# Altium footprint library KartaRfLibs.PcbLib: 51 footprints (part 1 of 4)
Each footprint in its own frame and in the unit in brackets; x right, y up, seen from the top. Pads: shape width x height; smd on the part's side, far side on the other; paste and mask are expansions set on the pad; w line width, h text height; cw(c..) or ccw(c..) is an arc to the next point about the centre after c.
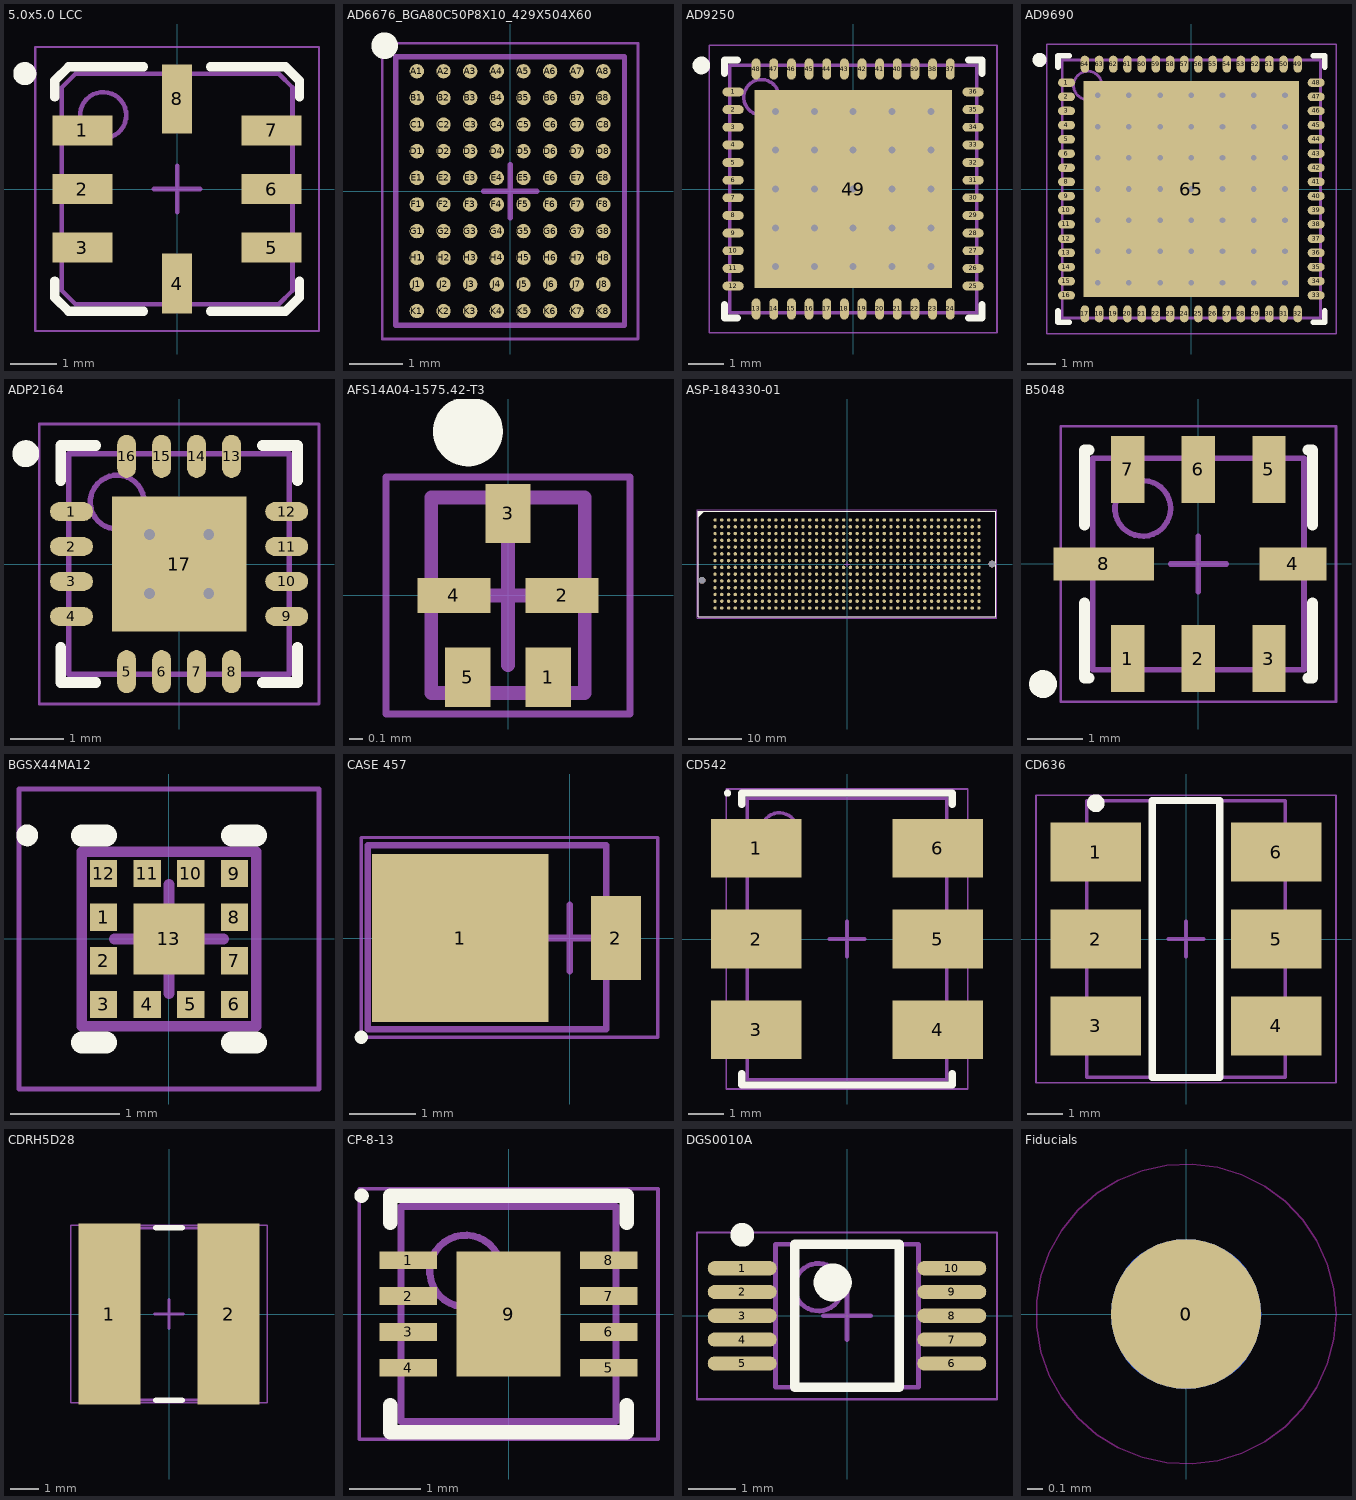
[diagram p0: the footprints below, top view; thin cyan lines are the x and y axes]

## 5.0x5.0 LCC [mm] "5.0x5.0 LCC 8-Leads, Body 5,00x5,00mm, Pitch 1,27mm, IPC Medium Density"
height 1.35
pads (8):
  rect 1.3x0.65 smd: 1(-2.05,1.27) 2(-2.05,0) 3(-2.05,-1.27) 5(2.05,-1.27) 6(2.05,0) 7(2.05,1.27)
  rect 0.65x1.3 smd: 4(0,-2.05)
  rect 0.65x1.5 smd: 8(0,1.95)
Top Overlay:
  circle w0.25: c-3.3,2.5 r0.125
  lines w0.2: -2.65,-1.995 -2.65,-2.35 -2.35,-2.65 -0.725,-2.65 ; -2.65,1.995 -2.65,2.35 -2.35,2.65 -0.725,2.65 ; 0.725,-2.65 2.35,-2.65 2.65,-2.35 2.65,-1.995 ; 0.725,2.65 2.35,2.65 2.65,2.35 2.65,1.995
Mechanical 13:
  circle w0.1: c-1.6,1.6 r0.5
  lines w0.1: -2.5,-2.2 -2.2,-2.5 2.2,-2.5 2.5,-2.2 2.5,2.2 2.2,2.5 -2.2,2.5 -2.5,2.2 -2.5,-2.2
Mechanical 15:
  lines w0.05: -3.075,-3.075 -3.075,3.075 3.075,3.075 3.075,-3.075 -3.075,-3.075
  lines w0.1: -0.5,0 0.5,0 ; 0,-0.5 0,0.5
3D body "5.0x5.0 LCC.step": height 1.35, standoff 0, extent -2.52,-2.52 2.52,2.52

## AD6676_BGA80C50P8X10_429X504X60 [mm] "AD6676 BGA, 80-Leads, Body 4,29x5,04mmx0,60mm, Pitch 0,50mm"
height 0.6
pads (80):
  round 0.27 smd: A1(-1.75,2.25) A2(-1.25,2.25) A3(-0.75,2.25) A4(-0.25,2.25) A5(0.25,2.25) A6(0.75,2.25) A7(1.25,2.25) A8(1.75,2.25) B1(-1.75,1.75) B2(-1.25,1.75) B3(-0.75,1.75) B4(-0.25,1.75) B5(0.25,1.75) B6(0.75,1.75) B7(1.25,1.75) B8(1.75,1.75) C1(-1.75,1.25) C2(-1.25,1.25) C3(-0.75,1.25) C4(-0.25,1.25) C5(0.25,1.25) C6(0.75,1.25) C7(1.25,1.25) C8(1.75,1.25) D1(-1.75,0.75) D2(-1.25,0.75) D3(-0.75,0.75) D4(-0.25,0.75) D5(0.25,0.75) D6(0.75,0.75) D7(1.25,0.75) D8(1.75,0.75) E1(-1.75,0.25) E2(-1.25,0.25) E3(-0.75,0.25) E4(-0.25,0.25) E5(0.25,0.25) E6(0.75,0.25) E7(1.25,0.25) E8(1.75,0.25) F1(-1.75,-0.25) F2(-1.25,-0.25) F3(-0.75,-0.25) F4(-0.25,-0.25) F5(0.25,-0.25) F6(0.75,-0.25) F7(1.25,-0.25) F8(1.75,-0.25) G1(-1.75,-0.75) G2(-1.25,-0.75) G3(-0.75,-0.75) G4(-0.25,-0.75) G5(0.25,-0.75) G6(0.75,-0.75) G7(1.25,-0.75) G8(1.75,-0.75) H1(-1.75,-1.25) H2(-1.25,-1.25) H3(-0.75,-1.25) H4(-0.25,-1.25) H5(0.25,-1.25) H6(0.75,-1.25) H7(1.25,-1.25) H8(1.75,-1.25) J1(-1.75,-1.75) J2(-1.25,-1.75) J3(-0.75,-1.75) J4(-0.25,-1.75) J5(0.25,-1.75) J6(0.75,-1.75) J7(1.25,-1.75) J8(1.75,-1.75) K1(-1.75,-2.25) K2(-1.25,-2.25) K3(-0.75,-2.25) K4(-0.25,-2.25) K5(0.25,-2.25) K6(0.75,-2.25) K7(1.25,-2.25) K8(1.75,-2.25)
Top Overlay:
  circle w0.25: c-2.355,2.73 r0.125
Mechanical 13:
  lines w0.1: -2.145,-2.52 -2.145,2.52 2.145,2.52 2.145,-2.52 -2.145,-2.52
Mechanical 15:
  lines w0.05: -2.4,-2.775 -2.4,2.775 2.4,2.775 2.4,-2.775 -2.4,-2.775
  lines w0.1: -0.5,0 0.5,0 ; 0,-0.5 0,0.5
3D body "AD6676_BGA80C50P8X10_429X504X60.step": height 0.6, standoff 0, extent -2.145,-2.52 2.145,2.52

## AD9250 [mm] "AD5250, QFN, 48-Leads, Body 7,00x7,00mm, Pitch 0,50mm, Thermal Pad 5,60x5,60mm, IPC Medium Density"
height 0.8
pads (49):
  oval 0.6x0.25 smd: 1(-3.4,2.75) 2(-3.4,2.25) 3(-3.4,1.75) 4(-3.4,1.25) 5(-3.4,0.75) 6(-3.4,0.25) 7(-3.4,-0.25) 8(-3.4,-0.75) 9(-3.4,-1.25) 10(-3.4,-1.75) 11(-3.4,-2.25) 12(-3.4,-2.75) 25(3.4,-2.75) 26(3.4,-2.25) 27(3.4,-1.75) 28(3.4,-1.25) 29(3.4,-0.75) 30(3.4,-0.25) 31(3.4,0.25) 32(3.4,0.75) 33(3.4,1.25) 34(3.4,1.75) 35(3.4,2.25) 36(3.4,2.75)
  oval 0.25x0.6 smd: 13(-2.75,-3.4) 14(-2.25,-3.4) 15(-1.75,-3.4) 16(-1.25,-3.4) 17(-0.75,-3.4) 18(-0.25,-3.4) 19(0.25,-3.4) 20(0.75,-3.4) 21(1.25,-3.4) 22(1.75,-3.4) 23(2.25,-3.4) 24(2.75,-3.4) 37(2.75,3.4) 38(2.25,3.4) 39(1.75,3.4) 40(1.25,3.4) 41(0.75,3.4) 42(0.25,3.4) 43(-0.25,3.4) 44(-0.75,3.4) 45(-1.25,3.4) 46(-1.75,3.4) 47(-2.25,3.4) 48(-2.75,3.4)
  rect 5.6x5.6 smd: 49(0,0)
via 2.2,-2.2 diameter 0.5 hole 0.2
via 1.1,-2.2 diameter 0.5 hole 0.2
via 0,-2.2 diameter 0.5 hole 0.2
via -1.1,-2.2 diameter 0.5 hole 0.2
via -2.2,-2.2 diameter 0.5 hole 0.2
via 2.2,-1.1 diameter 0.5 hole 0.2
via 1.1,-1.1 diameter 0.5 hole 0.2
via 0,-1.1 diameter 0.5 hole 0.2
via -1.1,-1.1 diameter 0.5 hole 0.2
via -2.2,-1.1 diameter 0.5 hole 0.2
via 2.2,0 diameter 0.5 hole 0.2
via 1.1,0 diameter 0.5 hole 0.2
via 0,0 diameter 0.5 hole 0.2
via -1.1,0 diameter 0.5 hole 0.2
via -2.2,0 diameter 0.5 hole 0.2
via 2.2,1.1 diameter 0.5 hole 0.2
via 1.1,1.1 diameter 0.5 hole 0.2
via 0,1.1 diameter 0.5 hole 0.2
via -1.1,1.1 diameter 0.5 hole 0.2
via -2.2,1.1 diameter 0.5 hole 0.2
via 2.2,2.2 diameter 0.5 hole 0.2
via 1.1,2.2 diameter 0.5 hole 0.2
via 0,2.2 diameter 0.5 hole 0.2
via -1.1,2.2 diameter 0.5 hole 0.2
via -2.2,2.2 diameter 0.5 hole 0.2
Top Overlay:
  circle w0.25: c-4.3,3.5 r0.125
  lines w0.2: -3.65,-3.275 -3.65,-3.65 -3.275,-3.65 ; -3.65,3.275 -3.65,3.65 -3.275,3.65 ; 3.275,-3.65 3.65,-3.65 3.65,-3.275 ; 3.275,3.65 3.65,3.65 3.65,3.275
Mechanical 13:
  circle w0.1: c-2.6,2.6 r0.5
  lines w0.1: -3.5,-3.5 3.5,-3.5 3.5,3.5 -3.5,3.5 -3.5,-3.5
Mechanical 15:
  lines w0.05: -4.075,-4.075 4.075,-4.075 4.075,4.075 -4.075,4.075 -4.075,-4.075
  lines w0.1: -0.5,0 0.5,0 ; 0,-0.5 0,0.5
3D body "AD5250.step": height 0.8, standoff 0, extent -3.52,-3.52 3.52,3.52

## AD9690 [mm] "AD9690 9 x 9mm, 64 pin, 0.5 pitch 7.6sq Pad"
height 0.8
pads (65):
  oval 0.6x0.3 smd: 1(-4.4,3.75) 2(-4.4,3.25) 3(-4.4,2.75) 4(-4.4,2.25) 5(-4.4,1.75) 6(-4.4,1.25) 7(-4.4,0.75) 8(-4.4,0.25) 9(-4.4,-0.25) 10(-4.4,-0.75) 11(-4.4,-1.25) 12(-4.4,-1.75) 13(-4.4,-2.25) 14(-4.4,-2.75) 15(-4.4,-3.25) 16(-4.4,-3.75) 33(4.4,-3.75) 34(4.4,-3.25) 35(4.4,-2.75) 36(4.4,-2.25) 37(4.4,-1.75) 38(4.4,-1.25) 39(4.4,-0.75) 40(4.4,-0.25) 41(4.4,0.25) 42(4.4,0.75) 43(4.4,1.25) 44(4.4,1.75) 45(4.4,2.25) 46(4.4,2.75) 47(4.4,3.25) 48(4.4,3.75)
  oval 0.3x0.6 smd: 17(-3.75,-4.4) 18(-3.25,-4.4) 19(-2.75,-4.4) 20(-2.25,-4.4) 21(-1.75,-4.4) 22(-1.25,-4.4) 23(-0.75,-4.4) 24(-0.25,-4.4) 25(0.25,-4.4) 26(0.75,-4.4) 27(1.25,-4.4) 28(1.75,-4.4) 29(2.25,-4.4) 30(2.75,-4.4) 31(3.25,-4.4) 32(3.75,-4.4) 49(3.75,4.4) 50(3.25,4.4) 51(2.75,4.4) 52(2.25,4.4) 53(1.75,4.4) 54(1.25,4.4) 55(0.75,4.4) 56(0.25,4.4) 57(-0.25,4.4) 58(-0.75,4.4) 59(-1.25,4.4) 60(-1.75,4.4) 61(-2.25,4.4) 62(-2.75,4.4) 63(-3.25,4.4) 64(-3.75,4.4)
  rect 7.6x7.6 smd: 65(0,0)
via 3.3,-3.3 diameter 0.5 hole 0.2
via 2.2,-3.3 diameter 0.5 hole 0.2
via 1.1,-3.3 diameter 0.5 hole 0.2
via 0,-3.3 diameter 0.5 hole 0.2
via -1.1,-3.3 diameter 0.5 hole 0.2
via -2.2,-3.3 diameter 0.5 hole 0.2
via -3.3,-3.3 diameter 0.5 hole 0.2
via 3.3,-2.2 diameter 0.5 hole 0.2
via 2.2,-2.2 diameter 0.5 hole 0.2
via 1.1,-2.2 diameter 0.5 hole 0.2
via 0,-2.2 diameter 0.5 hole 0.2
via -1.1,-2.2 diameter 0.5 hole 0.2
via -2.2,-2.2 diameter 0.5 hole 0.2
via -3.3,-2.2 diameter 0.5 hole 0.2
via 3.3,-1.1 diameter 0.5 hole 0.2
via 2.2,-1.1 diameter 0.5 hole 0.2
via 1.1,-1.1 diameter 0.5 hole 0.2
via 0,-1.1 diameter 0.5 hole 0.2
via -1.1,-1.1 diameter 0.5 hole 0.2
via -2.2,-1.1 diameter 0.5 hole 0.2
via -3.3,-1.1 diameter 0.5 hole 0.2
via 3.3,0 diameter 0.5 hole 0.2
via 2.2,0 diameter 0.5 hole 0.2
via 1.1,0 diameter 0.5 hole 0.2
via 0,0 diameter 0.5 hole 0.2
via -1.1,0 diameter 0.5 hole 0.2
via -2.2,0 diameter 0.5 hole 0.2
via -3.3,0 diameter 0.5 hole 0.2
via 3.3,1.1 diameter 0.5 hole 0.2
via 2.2,1.1 diameter 0.5 hole 0.2
via 1.1,1.1 diameter 0.5 hole 0.2
via 0,1.1 diameter 0.5 hole 0.2
via -1.1,1.1 diameter 0.5 hole 0.2
via -2.2,1.1 diameter 0.5 hole 0.2
via -3.3,1.1 diameter 0.5 hole 0.2
via 3.3,2.2 diameter 0.5 hole 0.2
via 2.2,2.2 diameter 0.5 hole 0.2
via 1.1,2.2 diameter 0.5 hole 0.2
via 0,2.2 diameter 0.5 hole 0.2
via -1.1,2.2 diameter 0.5 hole 0.2
via -2.2,2.2 diameter 0.5 hole 0.2
via -3.3,2.2 diameter 0.5 hole 0.2
via 3.3,3.3 diameter 0.5 hole 0.2
via 2.2,3.3 diameter 0.5 hole 0.2
via 1.1,3.3 diameter 0.5 hole 0.2
via 0,3.3 diameter 0.5 hole 0.2
via -1.1,3.3 diameter 0.5 hole 0.2
via -2.2,3.3 diameter 0.5 hole 0.2
via -3.3,3.3 diameter 0.5 hole 0.2
Top Overlay:
  circle w0.25: c-5.35,4.55 r0.125
  lines w0.2: -4.7,-4.3 -4.7,-4.7 -4.3,-4.7 ; -4.7,4.3 -4.7,4.7 -4.3,4.7 ; 4.3,-4.7 4.7,-4.7 4.7,-4.3 ; 4.3,4.7 4.7,4.7 4.7,4.3
Mechanical 13:
  circle w0.1: c-3.65,3.65 r0.5
  lines w0.1: -4.55,-4.55 4.55,-4.55 4.55,4.55 -4.55,4.55 -4.55,-4.55
Mechanical 15:
  lines w0.05: -5.1,-5.1 5.1,-5.1 5.1,5.1 -5.1,5.1 -5.1,-5.1
  lines w0.1: -0.5,0 0.5,0 ; 0,-0.5 0,0.5
3D body "AD9690.step": height 0.8, standoff 0, extent -4.57,-4.57 4.57,4.57

## ADP2164 [mm] "ADP2164, QFN, 16-Leads, Body 4,00x4,00mm, Pitch 0,65mm, Thermal Pad 2,50x2,50mm, IPC Medium Density"
height 0.8
pads (17):
  oval 0.8x0.35 smd: 1(-2,0.975) 2(-2,0.325) 3(-2,-0.325) 4(-2,-0.975) 9(2,-0.975) 10(2,-0.325) 11(2,0.325) 12(2,0.975)
  oval 0.35x0.8 smd: 5(-0.975,-2) 6(-0.325,-2) 7(0.325,-2) 8(0.975,-2) 13(0.975,2) 14(0.325,2) 15(-0.325,2) 16(-0.975,2)
  rect 2.5x2.5 smd: 17(0,0)
via -0.55,0.55 diameter 0.5 hole 0.2
via 0.55,0.55 diameter 0.5 hole 0.2
via -0.55,-0.55 diameter 0.5 hole 0.2
via 0.55,-0.55 diameter 0.5 hole 0.2
Top Overlay:
  circle w0.25: c-2.85,2.05 r0.125
  lines w0.2: -2.2,-1.55 -2.2,-2.2 -1.55,-2.2 ; -2.2,1.55 -2.2,2.2 -1.55,2.2 ; 1.55,-2.2 2.2,-2.2 2.2,-1.55 ; 1.55,2.2 2.2,2.2 2.2,1.55
Mechanical 13:
  circle w0.1: c-1.15,1.15 r0.5
  lines w0.1: -2.05,-2.05 -2.05,2.05 2.05,2.05 2.05,-2.05 -2.05,-2.05
Mechanical 15:
  lines w0.05: -2.6,-2.6 -2.6,2.6 2.6,2.6 2.6,-2.6 -2.6,-2.6
  lines w0.1: -0.5,0 0.5,0 ; 0,-0.5 0,0.5
3D body "ADP2164.step": height 0.8, standoff 0, extent -2.06,-2.06 2.06,2.06

## AFS14A04-1575.42-T3 [mm] "AFS14A04-1575.42-T3, SAW Filter, 6-Leads, Body 1,40x0,90mm, Pitch 0,50mm, IPC Medium Density"
height 0.7
pads (5):
  rect 0.325x0.425 smd: 1(0.288,-0.587) 3(0,0.587) 5(-0.288,-0.587)
  rect 0.525x0.25 smd: 2(0.387,0) 4(-0.387,0)
Top Overlay:
  circle w0.25: c-0.288,1.175 r0.125
Mechanical 13:
  lines w0.1: -0.55,-0.7 0.55,-0.7 0.55,0.7 -0.55,0.7 -0.55,-0.7
Mechanical 15:
  lines w0.05: -0.875,-0.85 0.875,-0.85 0.875,0.85 -0.875,0.85 -0.875,-0.85
  lines w0.1: -0.5,0 0.5,0 ; 0,-0.5 0,0.5
3D body "AFS14A04-1575.42-T3.step": height 0.7, standoff 0, extent -0.548,-0.698 0.548,0.698

## ASP-184330-01 [mm] "Samtec ASP-184330-01 FMC+ connector, 560-Leads, Body 55,78x19,76mmx7,11mm, Pitch 1,27mm"
height 7.12
pads (560):
  round 0.64 smd paste+0 mask+0.125: A1(24.765,5.715) A2(23.495,5.715) A3(22.225,5.715) A4(20.955,5.715) A5(19.685,5.715) A6(18.415,5.715) A7(17.145,5.715) A8(15.875,5.715) A9(14.605,5.715) A10(13.335,5.715) A11(12.065,5.715) A12(10.795,5.715) A13(9.525,5.715) A14(8.255,5.715) A15(6.985,5.715) A16(5.715,5.715) A17(4.445,5.715) A18(3.175,5.715) A19(1.905,5.715) A20(0.635,5.715) A21(-0.635,5.715) A22(-1.905,5.715) A23(-3.175,5.715) A24(-4.445,5.715) A25(-5.715,5.715) A26(-6.985,5.715) A27(-8.255,5.715) A28(-9.525,5.715) A29(-10.795,5.715) A30(-12.065,5.715) A31(-13.335,5.715) A32(-14.605,5.715) A33(-15.875,5.715) A34(-17.145,5.715) A35(-18.415,5.715) A36(-19.685,5.715) A37(-20.955,5.715) A38(-22.225,5.715) A39(-23.495,5.715) A40(-24.765,5.715) B1(24.765,4.445) B2(23.495,4.445) B3(22.225,4.445) B4(20.955,4.445) B5(19.685,4.445) B6(18.415,4.445) B7(17.145,4.445) B8(15.875,4.445) B9(14.605,4.445) B10(13.335,4.445) B11(12.065,4.445) B12(10.795,4.445) B13(9.525,4.445) B14(8.255,4.445) B15(6.985,4.445) B16(5.715,4.445) B17(4.445,4.445) B18(3.175,4.445) B19(1.905,4.445) B20(0.635,4.445) B21(-0.635,4.445) B22(-1.905,4.445) B23(-3.175,4.445) B24(-4.445,4.445) B25(-5.715,4.445) B26(-6.985,4.445) B27(-8.255,4.445) B28(-9.525,4.445) B29(-10.795,4.445) B30(-12.065,4.445) B31(-13.335,4.445) B32(-14.605,4.445) B33(-15.875,4.445) B34(-17.145,4.445) B35(-18.415,4.445) B36(-19.685,4.445) B37(-20.955,4.445) B38(-22.225,4.445) B39(-23.495,4.445) B40(-24.765,4.445) C1(24.765,3.175) C2(23.495,3.175) C3(22.225,3.175) C4(20.955,3.175) C5(19.685,3.175) C6(18.415,3.175) C7(17.145,3.175) C8(15.875,3.175) C9(14.605,3.175) C10(13.335,3.175) C11(12.065,3.175) C12(10.795,3.175) C13(9.525,3.175) C14(8.255,3.175) C15(6.985,3.175) C16(5.715,3.175) C17(4.445,3.175) C18(3.175,3.175) C19(1.905,3.175) C20(0.635,3.175) C21(-0.635,3.175) C22(-1.905,3.175) C23(-3.175,3.175) C24(-4.445,3.175) C25(-5.715,3.175) C26(-6.985,3.175) C27(-8.255,3.175) C28(-9.525,3.175) C29(-10.795,3.175) C30(-12.065,3.175) C31(-13.335,3.175) C32(-14.605,3.175) C33(-15.875,3.175) C34(-17.145,3.175) C35(-18.415,3.175) C36(-19.685,3.175) C37(-20.955,3.175) C38(-22.225,3.175) C39(-23.495,3.175) C40(-24.765,3.175) D1(24.765,1.905) D2(23.495,1.905) D3(22.225,1.905) D4(20.955,1.905) D5(19.685,1.905) D6(18.415,1.905) D7(17.145,1.905) D8(15.875,1.905) D9(14.605,1.905) D10(13.335,1.905) D11(12.065,1.905) D12(10.795,1.905) D13(9.525,1.905) D14(8.255,1.905) D15(6.985,1.905) D16(5.715,1.905) D17(4.445,1.905) D18(3.175,1.905) D19(1.905,1.905) D20(0.635,1.905) D21(-0.635,1.905) D22(-1.905,1.905) D23(-3.175,1.905) D24(-4.445,1.905) D25(-5.715,1.905) D26(-6.985,1.905) D27(-8.255,1.905) D28(-9.525,1.905) D29(-10.795,1.905) D30(-12.065,1.905) D31(-13.335,1.905) D32(-14.605,1.905) D33(-15.875,1.905) D34(-17.145,1.905) D35(-18.415,1.905) D36(-19.685,1.905) D37(-20.955,1.905) D38(-22.225,1.905) D39(-23.495,1.905) D40(-24.765,1.905) E1(24.765,0.635) E2(23.495,0.635) E3(22.225,0.635) E4(20.955,0.635) E5(19.685,0.635) E6(18.415,0.635) E7(17.145,0.635) E8(15.875,0.635) E9(14.605,0.635) E10(13.335,0.635) E11(12.065,0.635) E12(10.795,0.635) E13(9.525,0.635) E14(8.255,0.635) E15(6.985,0.635) E16(5.715,0.635) E17(4.445,0.635) E18(3.175,0.635) E19(1.905,0.635) E20(0.635,0.635) E21(-0.635,0.635) E22(-1.905,0.635) E23(-3.175,0.635) E24(-4.445,0.635) E25(-5.715,0.635) E26(-6.985,0.635) E27(-8.255,0.635) E28(-9.525,0.635) E29(-10.795,0.635) E30(-12.065,0.635) E31(-13.335,0.635) E32(-14.605,0.635) E33(-15.875,0.635) E34(-17.145,0.635) E35(-18.415,0.635) E36(-19.685,0.635) E37(-20.955,0.635) E38(-22.225,0.635) E39(-23.495,0.635) E40(-24.765,0.635) F1(24.765,-0.635) F2(23.495,-0.635) F3(22.225,-0.635) F4(20.955,-0.635) F5(19.685,-0.635) F6(18.415,-0.635) F7(17.145,-0.635) F8(15.875,-0.635) F9(14.605,-0.635) F10(13.335,-0.635) F11(12.065,-0.635) F12(10.795,-0.635) F13(9.525,-0.635) F14(8.255,-0.635) F15(6.985,-0.635) F16(5.715,-0.635) F17(4.445,-0.635) F18(3.175,-0.635) F19(1.905,-0.635) F20(0.635,-0.635) F21(-0.635,-0.635) F22(-1.905,-0.635) F23(-3.175,-0.635) F24(-4.445,-0.635) F25(-5.715,-0.635) F26(-6.985,-0.635) F27(-8.255,-0.635) F28(-9.525,-0.635) F29(-10.795,-0.635) F30(-12.065,-0.635) F31(-13.335,-0.635) F32(-14.605,-0.635) F33(-15.875,-0.635) F34(-17.145,-0.635) F35(-18.415,-0.635) F36(-19.685,-0.635) F37(-20.955,-0.635) F38(-22.225,-0.635) F39(-23.495,-0.635) F40(-24.765,-0.635) G1(24.765,-1.905) G2(23.495,-1.905) G3(22.225,-1.905) G4(20.955,-1.905) G5(19.685,-1.905) G6(18.415,-1.905) G7(17.145,-1.905) G8(15.875,-1.905) G9(14.605,-1.905) G10(13.335,-1.905) G11(12.065,-1.905) G12(10.795,-1.905) G13(9.525,-1.905) G14(8.255,-1.905) G15(6.985,-1.905) G16(5.715,-1.905) G17(4.445,-1.905) G18(3.175,-1.905) G19(1.905,-1.905) G20(0.635,-1.905) G21(-0.635,-1.905) G22(-1.905,-1.905) G23(-3.175,-1.905) G24(-4.445,-1.905) G25(-5.715,-1.905) G26(-6.985,-1.905) G27(-8.255,-1.905) G28(-9.525,-1.905) G29(-10.795,-1.905) G30(-12.065,-1.905) G31(-13.335,-1.905) G32(-14.605,-1.905) G33(-15.875,-1.905) G34(-17.145,-1.905) G35(-18.415,-1.905) G36(-19.685,-1.905) G37(-20.955,-1.905) G38(-22.225,-1.905) G39(-23.495,-1.905) G40(-24.765,-1.905) H1(24.765,-3.175) H2(23.495,-3.175) H3(22.225,-3.175) H4(20.955,-3.175) H5(19.685,-3.175) H6(18.415,-3.175) H7(17.145,-3.175) H8(15.875,-3.175) H9(14.605,-3.175) H10(13.335,-3.175) H11(12.065,-3.175) H12(10.795,-3.175) H13(9.525,-3.175) H14(8.255,-3.175) H15(6.985,-3.175) H16(5.715,-3.175) H17(4.445,-3.175) H18(3.175,-3.175) H19(1.905,-3.175) H20(0.635,-3.175) H21(-0.635,-3.175) H22(-1.905,-3.175) H23(-3.175,-3.175) H24(-4.445,-3.175) H25(-5.715,-3.175) H26(-6.985,-3.175) H27(-8.255,-3.175) H28(-9.525,-3.175) H29(-10.795,-3.175) H30(-12.065,-3.175) H31(-13.335,-3.175) H32(-14.605,-3.175) H33(-15.875,-3.175) H34(-17.145,-3.175) H35(-18.415,-3.175) H36(-19.685,-3.175) H37(-20.955,-3.175) H38(-22.225,-3.175) H39(-23.495,-3.175) H40(-24.765,-3.175) J1(24.765,-4.445) J2(23.495,-4.445) J3(22.225,-4.445) J4(20.955,-4.445) J5(19.685,-4.445) J6(18.415,-4.445) J7(17.145,-4.445) J8(15.875,-4.445) J9(14.605,-4.445) J10(13.335,-4.445) J11(12.065,-4.445) J12(10.795,-4.445) J13(9.525,-4.445) J14(8.255,-4.445) J15(6.985,-4.445) J16(5.715,-4.445) J17(4.445,-4.445) J18(3.175,-4.445) J19(1.905,-4.445) J20(0.635,-4.445) J21(-0.635,-4.445) J22(-1.905,-4.445) J23(-3.175,-4.445) J24(-4.445,-4.445) J25(-5.715,-4.445) J26(-6.985,-4.445) J27(-8.255,-4.445) J28(-9.525,-4.445) J29(-10.795,-4.445) J30(-12.065,-4.445) J31(-13.335,-4.445) J32(-14.605,-4.445) J33(-15.875,-4.445) J34(-17.145,-4.445) J35(-18.415,-4.445) J36(-19.685,-4.445) J37(-20.955,-4.445) J38(-22.225,-4.445) J39(-23.495,-4.445) J40(-24.765,-4.445) K1(24.765,-5.715) K2(23.495,-5.715) K3(22.225,-5.715) K4(20.955,-5.715) K5(19.685,-5.715) K6(18.415,-5.715) K7(17.145,-5.715) K8(15.875,-5.715) K9(14.605,-5.715) K10(13.335,-5.715) K11(12.065,-5.715) K12(10.795,-5.715) K13(9.525,-5.715) K14(8.255,-5.715) K15(6.985,-5.715) K16(5.715,-5.715) K17(4.445,-5.715) K18(3.175,-5.715) K19(1.905,-5.715) K20(0.635,-5.715) K21(-0.635,-5.715) K22(-1.905,-5.715) K23(-3.175,-5.715) K24(-4.445,-5.715) K25(-5.715,-5.715) K26(-6.985,-5.715) K27(-8.255,-5.715) K28(-9.525,-5.715) K29(-10.795,-5.715) K30(-12.065,-5.715) K31(-13.335,-5.715) K32(-14.605,-5.715) K33(-15.875,-5.715) K34(-17.145,-5.715) K35(-18.415,-5.715) K36(-19.685,-5.715) K37(-20.955,-5.715) K38(-22.225,-5.715) K39(-23.495,-5.715) K40(-24.765,-5.715) L1(24.765,-6.985) L2(23.495,-6.985) L3(22.225,-6.985) L4(20.955,-6.985) L5(19.685,-6.985) L6(18.415,-6.985) L7(17.145,-6.985) L8(15.875,-6.985) L9(14.605,-6.985) L10(13.335,-6.985) L11(12.065,-6.985) L12(10.795,-6.985) L13(9.525,-6.985) L14(8.255,-6.985) L15(6.985,-6.985) L16(5.715,-6.985) L17(4.445,-6.985) L18(3.175,-6.985) L19(1.905,-6.985) L20(0.635,-6.985) L21(-0.635,-6.985) L22(-1.905,-6.985) L23(-3.175,-6.985) L24(-4.445,-6.985) L25(-5.715,-6.985) L26(-6.985,-6.985) L27(-8.255,-6.985) L28(-9.525,-6.985) L29(-10.795,-6.985) L30(-12.065,-6.985) L31(-13.335,-6.985) L32(-14.605,-6.985) L33(-15.875,-6.985) L34(-17.145,-6.985) L35(-18.415,-6.985) L36(-19.685,-6.985) L37(-20.955,-6.985) L38(-22.225,-6.985) L39(-23.495,-6.985) L40(-24.765,-6.985) M1(24.765,-8.255) M2(23.495,-8.255) M3(22.225,-8.255) M4(20.955,-8.255) M5(19.685,-8.255) M6(18.415,-8.255) M7(17.145,-8.255) M8(15.875,-8.255) M9(14.605,-8.255) M10(13.335,-8.255) M11(12.065,-8.255) M12(10.795,-8.255) M13(9.525,-8.255) M14(8.255,-8.255) M15(6.985,-8.255) M16(5.715,-8.255) M17(4.445,-8.255) M18(3.175,-8.255) M19(1.905,-8.255) M20(0.635,-8.255) M21(-0.635,-8.255) M22(-1.905,-8.255) M23(-3.175,-8.255) M24(-4.445,-8.255) M25(-5.715,-8.255) M26(-6.985,-8.255) M27(-8.255,-8.255) M28(-9.525,-8.255) M29(-10.795,-8.255) M30(-12.065,-8.255) M31(-13.335,-8.255) M32(-14.605,-8.255) M33(-15.875,-8.255) M34(-17.145,-8.255) M35(-18.415,-8.255) M36(-19.685,-8.255) M37(-20.955,-8.255) M38(-22.225,-8.255) M39(-23.495,-8.255) M40(-24.765,-8.255) Y1(24.765,8.255) Y2(23.495,8.255) Y3(22.225,8.255) Y4(20.955,8.255) Y5(19.685,8.255) Y6(18.415,8.255) Y7(17.145,8.255) Y8(15.875,8.255) Y9(14.605,8.255) Y10(13.335,8.255) Y11(12.065,8.255) Y12(10.795,8.255) Y13(9.525,8.255) Y14(8.255,8.255) Y15(6.985,8.255) Y16(5.715,8.255) Y17(4.445,8.255) Y18(3.175,8.255) Y19(1.905,8.255) Y20(0.635,8.255) Y21(-0.635,8.255) Y22(-1.905,8.255) Y23(-3.175,8.255) Y24(-4.445,8.255) Y25(-5.715,8.255) Y26(-6.985,8.255) Y27(-8.255,8.255) Y28(-9.525,8.255) Y29(-10.795,8.255) Y30(-12.065,8.255) Y31(-13.335,8.255) Y32(-14.605,8.255) Y33(-15.875,8.255) Y34(-17.145,8.255) Y35(-18.415,8.255) Y36(-19.685,8.255) Y37(-20.955,8.255) Y38(-22.225,8.255) Y39(-23.495,8.255) Y40(-24.765,8.255) Z1(24.765,6.985) Z2(23.495,6.985) Z3(22.225,6.985) Z4(20.955,6.985) Z5(19.685,6.985) Z6(18.415,6.985) Z7(17.145,6.985) Z8(15.875,6.985) Z9(14.605,6.985) Z10(13.335,6.985) Z11(12.065,6.985) Z12(10.795,6.985) Z13(9.525,6.985) Z14(8.255,6.985) Z15(6.985,6.985) Z16(5.715,6.985) Z17(4.445,6.985) Z18(3.175,6.985) Z19(1.905,6.985) Z20(0.635,6.985) Z21(-0.635,6.985) Z22(-1.905,6.985) Z23(-3.175,6.985) Z24(-4.445,6.985) Z25(-5.715,6.985) Z26(-6.985,6.985) Z27(-8.255,6.985) Z28(-9.525,6.985) Z29(-10.795,6.985) Z30(-12.065,6.985) Z31(-13.335,6.985) Z32(-14.605,6.985) Z33(-15.875,6.985) Z34(-17.145,6.985) Z35(-18.415,6.985) Z36(-19.685,6.985) Z37(-20.955,6.985) Z38(-22.225,6.985) Z39(-23.495,6.985) Z40(-24.765,6.985)
via 27.191,0 diameter 1.27 hole 1.27
via -27.191,-3.05 diameter 1.27 hole 1.27
Top Overlay:
  region: -26.9,9.875 -27.9,8.875 -27.9,9.875
  lines w0.2: -27.9,8.875 -26.9,9.875 ; -27.9,-9.875 -27.9,9.875 27.9,9.875 27.9,-9.875 -27.9,-9.875
Mechanical 13:
  lines w0.1: -27.89,-9.88 -27.89,9.88 27.89,9.88 27.89,-9.88 -27.89,-9.88
Mechanical 15:
  lines w0.05: -28.15,-10.15 -28.15,10.15 28.15,10.15 28.15,-10.15 -28.15,-10.15
  lines w0.1: -0.5,0 0.5,0 ; 0,-0.5 0,0.5
3D body "ASP-184330-01.step": height 7.11, standoff 0, extent -27.89,-9.88 27.89,9.88

## B5048 [mm] "B5048, Tetra SAW, QFN, 8-Leads, Body 3,80x3,80mm, Pitch 1,27mm, IPC Medium Density"
height 1.5
pads (8):
  rect 0.6x1.2 smd: 1(-1.27,-1.7) 2(0,-1.7) 3(1.27,-1.7) 5(1.27,1.7) 6(0,1.7) 7(-1.27,1.7)
  rect 1.2x0.6 smd: 4(1.7,0)
  rect 1.8x0.6 smd: 8(-1.7,0)
Top Overlay:
  circle w0.25: c-2.794,-2.159 r0.125
  lines w0.2: -2.05,-0.7 -2.05,-2.05 -1.97,-2.05 ; -2.05,0.7 -2.05,2.05 -1.97,2.05 ; 1.97,-2.05 2.05,-2.05 2.05,-0.7 ; 1.97,2.05 2.05,2.05 2.05,0.7
Mechanical 13:
  circle w0.1: c-1,1 r0.5
  lines w0.1: -1.9,-1.9 -1.9,1.9 1.9,1.9 1.9,-1.9 -1.9,-1.9
Mechanical 15:
  lines w0.05: -2.475,-2.475 -2.475,2.475 2.475,2.475 2.475,-2.475 -2.475,-2.475
  lines w0.1: -0.5,0 0.5,0 ; 0,-0.5 0,0.5
3D body "B5048.step": height 1.5, standoff 0, extent -1.92,-1.92 1.92,1.92

## BGSX44MA12 [mm] "BGSX44MA12, 12-Leads, Body 1,60x1,60mm, Pitch 0,40mm, Thermal Pad 0,65x0,65mm, IPC Medium Density"
height 0.6
pads (13):
  rect 0.25x0.25 smd: 1(-0.6,0.2) 2(-0.6,-0.2) 3(-0.6,-0.6) 4(-0.2,-0.6) 5(0.2,-0.6) 6(0.6,-0.6) 7(0.6,-0.2) 8(0.6,0.2) 9(0.6,0.6) 10(0.2,0.6) 11(-0.2,0.6) 12(-0.6,0.6)
  rect 0.65x0.65 smd: 13(0,0)
Top Overlay:
  circle w0.1: c-1.3,0.95 r0.05
  lines w0.2: -0.8,-0.95 -0.575,-0.95 ; -0.8,0.95 -0.575,0.95 ; 0.575,-0.95 0.8,-0.95 ; 0.575,0.95 0.8,0.95
Mechanical 13:
  lines w0.1: -0.8,-0.8 -0.8,0.8 0.8,0.8 0.8,-0.8 -0.8,-0.8
Mechanical 15:
  lines w0.05: -1.375,-1.375 -1.375,1.375 1.375,1.375 1.375,-1.375 -1.375,-1.375
  lines w0.1: -0.5,0 0.5,0 ; 0,-0.5 0,0.5
3D body "BGSX44MA12.step": height 0.6, standoff 0, extent -0.82,-0.82 0.82,0.82

## CASE 457 [mil] "CASE 457-04, MBRM140T1G"
height 39.37
pads (2):
  rect 105.12x100 smd: 1(-65.06,0)
  rect 30x50 smd: 2(27.5,0)
Top Overlay:
  circle w3.94: c-124.02,-59.06 r1.97
Mechanical 13:
  lines w3.94: -120.08,-54.33 21.65,-54.33 21.65,55.12 -120.08,55.12 -120.08,-54.33
Mechanical 15:
  lines w1.97: -124.02,-59.06 52.36,-59.06 52.36,59.84 -124.02,59.84 -124.02,-59.06
  lines w3.94: -19.68,0 19.68,0 ; 0,-19.68 0,19.68
3D body: height 43.31, standoff 0, extent -118.11,-51.97 27.17,53.15

## CD542 [mm] "CD542, RF Transformer, 6-Leads, Body 7,87x5,59mm, Pitch 2,54mm, IPC Medium Density"
height 2.65
pads (6):
  rect 2.54x1.65 smd: 1(-2.54,2.54) 2(-2.54,0) 3(-2.54,-2.54) 4(2.54,-2.54) 5(2.54,0) 6(2.54,2.54)
Top Overlay:
  circle w0.1: c-3.345,4.085 r0.05
  lines w0.2: -2.945,-3.765 -2.945,-4.085 2.945,-4.085 2.945,-3.765 ; -2.945,3.765 -2.945,4.085 2.945,4.085 2.945,3.765
Mechanical 13:
  circle w0.1: c-1.895,3.035 r0.5
  lines w0.1: -2.795,-3.935 2.795,-3.935 2.795,3.935 -2.795,3.935 -2.795,-3.935
Mechanical 15:
  lines w0.05: -3.38,-4.2 3.38,-4.2 3.38,4.2 -3.38,4.2 -3.38,-4.2
  lines w0.1: -0.5,0 0.5,0 ; 0,-0.5 0,0.5
3D body "CD542 .step": height 2.65, standoff 0.1, extent -2.795,-3.935 2.795,3.935

## CD636 [mm] "CD636,  6-Leads, Body 7,78x7,62mm, Pitch 2,45mm, IPC Medium Density"
height 4.11
pads (6):
  rect 2.54x1.65 smd: 1(-2.54,2.45) 2(-2.54,0) 3(-2.54,-2.45) 4(2.54,-2.45) 5(2.54,0) 6(2.54,2.45)
Top Overlay:
  circle w0.25: c-2.54,3.825 r0.125
  lines w0.2: -0.95,-3.9 -0.95,3.9 0.95,3.9 0.95,-3.9 -0.95,-3.9
Mechanical 13:
  lines w0.1: -2.795,-3.89 2.795,-3.89 2.795,3.89 -2.795,3.89 -2.795,-3.89
Mechanical 15:
  lines w0.05: -4.225,-4.05 4.225,-4.05 4.225,4.05 -4.225,4.05 -4.225,-4.05
  lines w0.1: -0.5,0 0.5,0 ; 0,-0.5 0,0.5
3D body "CD636.step": height 4.11, standoff 0, extent -3.81,-3.888 3.81,3.888

## CDRH5D28 [mm] "CDRH5D28 , Precision Wire Wound Inductor, 2-Leads, Body 6,00x6,00mm, IPC High Density"
height 3
pads (2):
  rect 2.15x6.3 smd: 1(-2.075,0) 2(2.075,0)
Top Overlay:
  lines w0.2: -0.45,-3 0.45,-3 ; -0.45,3 0.45,3
Mechanical 13:
  lines w0.1: -3,-3 -3,3 3,3 3,-3 -3,-3
Mechanical 15:
  lines w0.05: -3.425,-3.1 -3.425,3.1 3.425,3.1 3.425,-3.1 -3.425,-3.1
  lines w0.1: -0.5,0 0.5,0 ; 0,-0.5 0,0.5
3D body "CDRH5D28 .step": height 3.1, standoff 0, extent -3.1,-3.15 3.1,3.15

## CP-8-13 [mm] "CP-8-13, 8-Leads, Body 3,00x3,00mm, Pitch 0,50mm, Thermal Pad 0,00x0,00mm, IPC Medium Density"
height 0.7
pads (9):
  rect 0.8x0.25 smd: 1(-1.4,0.75) 2(-1.4,0.25) 3(-1.4,-0.25) 4(-1.4,-0.75) 5(1.4,-0.75) 6(1.4,-0.25) 7(1.4,0.25) 8(1.4,0.75)
  rect 1.45x1.74 smd: 9(0,0)
Top Overlay:
  circle w0.1: c-2.05,1.65 r0.05
  lines w0.2: -1.65,-1.275 -1.65,-1.65 1.65,-1.65 1.65,-1.275 ; -1.65,1.275 -1.65,1.65 1.65,1.65 1.65,1.275
Mechanical 13:
  circle w0.1: c-0.6,0.6 r0.5
  lines w0.1: -1.5,-1.5 1.5,-1.5 1.5,1.5 -1.5,1.5 -1.5,-1.5
Mechanical 15:
  lines w0.05: -2.085,-1.75 2.085,-1.75 2.085,1.75 -2.085,1.75 -2.085,-1.75
  lines w0.1: -0.5,0 0.5,0 ; 0,-0.5 0,0.5
3D body "CP-8-13.step": height 0.7, standoff 0, extent -1.6,-1.5 1.6,1.5

## DGS0010A [mm] "INA226, 10-Leads, Body 3,00x3,00mm, Pitch 0,50mm, IPC Medium Density"
height 1
pads (10):
  oval 1.45x0.3 smd: 1(-2.2,1) 2(-2.2,0.5) 3(-2.2,0) 4(-2.2,-0.5) 5(-2.2,-1) 6(2.2,-1) 7(2.2,-0.5) 8(2.2,0) 9(2.2,0.5) 10(2.2,1)
Top Overlay:
  circle w0.4: c-0.3,0.7 r0.2
  circle w0.25: c-2.2,1.7 r0.125
  lines w0.2: -1.1,-1.5 1.1,-1.5 1.1,1.5 -1.1,1.5 -1.1,-1.5
Mechanical 13:
  circle w0.1: c-0.6,0.6 r0.5
  lines w0.1: -1.5,-1.5 1.5,-1.5 1.5,1.5 -1.5,1.5 -1.5,-1.5
Mechanical 15:
  lines w0.05: -3.15,-1.75 3.15,-1.75 3.15,1.75 -3.15,1.75 -3.15,-1.75
  lines w0.1: -0.5,0 0.5,0 ; 0,-0.5 0,0.5
3D body "DGS0010A.step": height 1, standoff 0, extent -2.45,-1.5 2.45,1.5

## Fiducials [mm]
pads (2):
  round 1 smd paste-10 mask+0.5: 0(0,0)
  round 1 smd far side paste-10 mask+0.5: 0(0,0)
Keep-Out Layer:
  circle w0.01: c0,0 r1